# Altium footprint library PCB_Module.PcbLib: 31 footprints (part 2 of 2)
Each footprint in its own frame and in the unit in brackets; x right, y up, seen from the top. Pads: shape width x height; smd on the part's side, far side on the other; paste and mask are expansions set on the pad; w line width, h text height; cw(c..) or ccw(c..) is an arc to the next point about the centre after c.
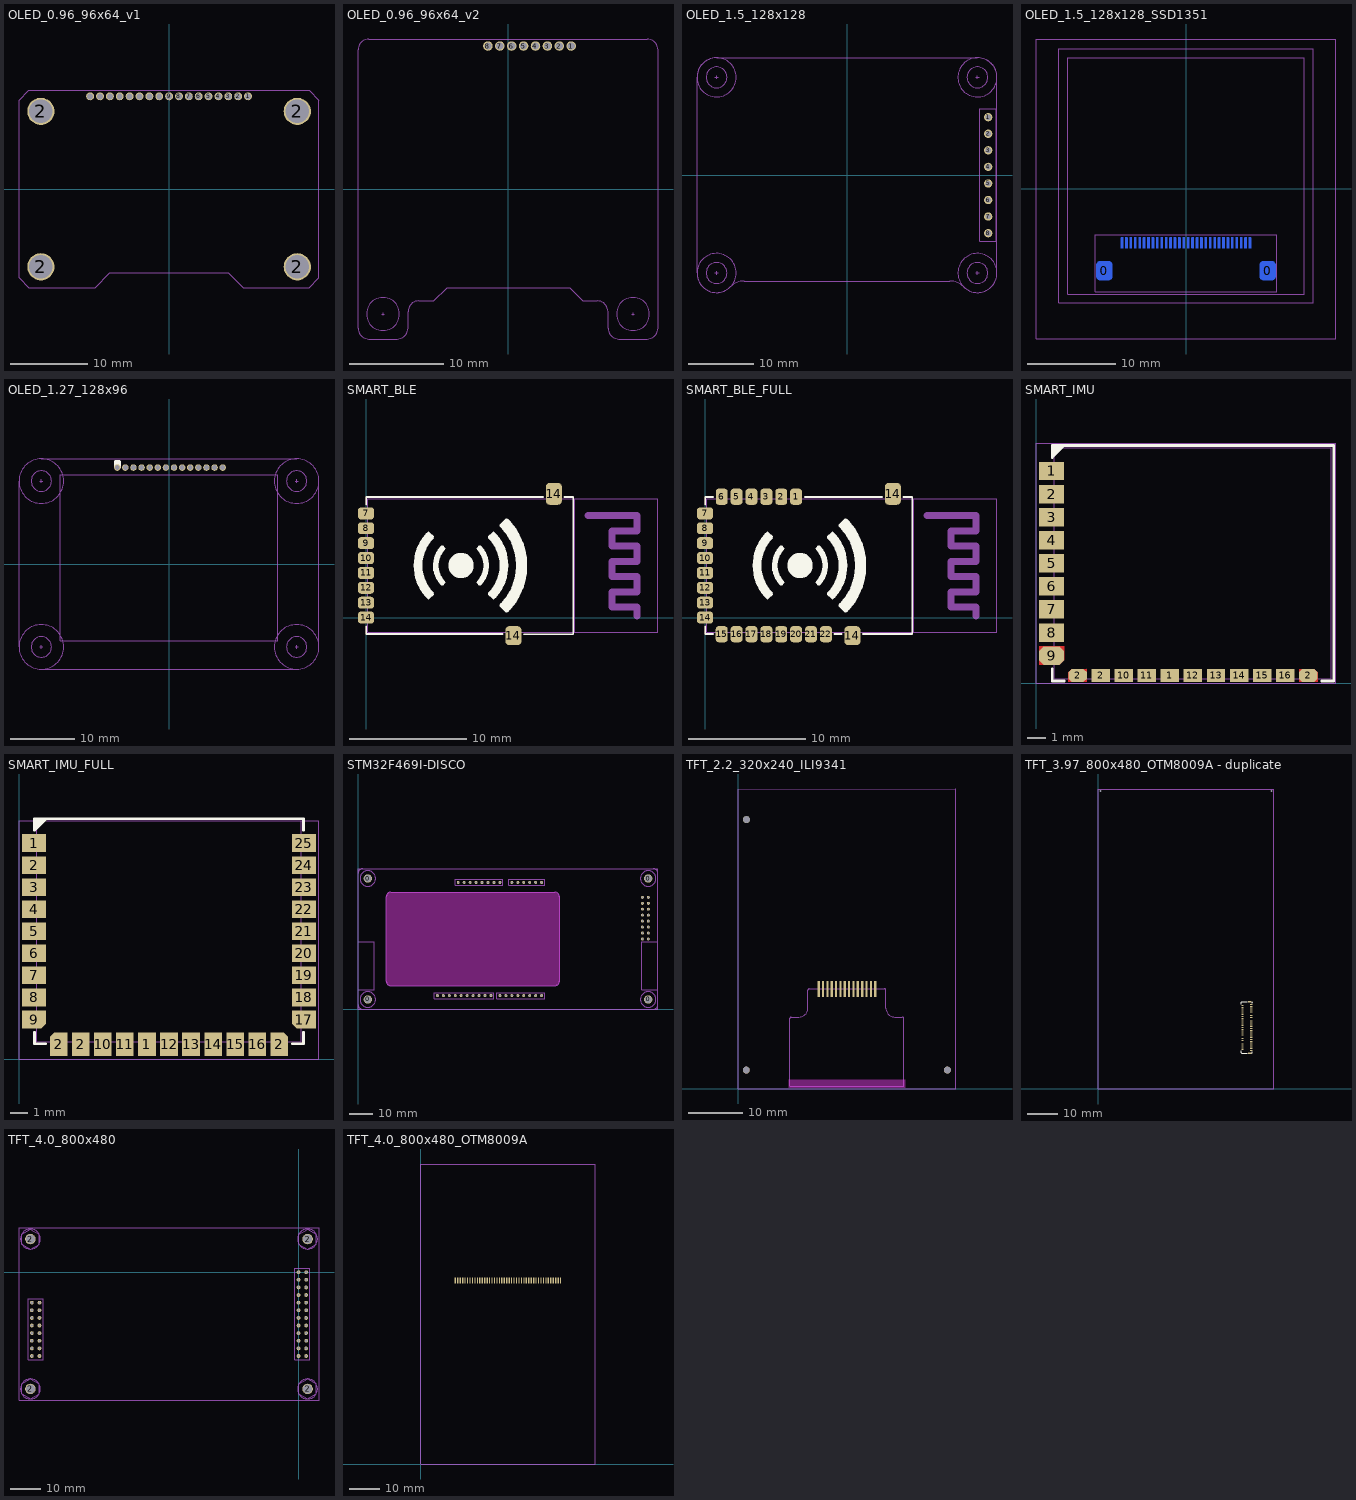
[diagram p1: the footprints below, top view; thin cyan lines are the x and y axes]

## OLED_0.96_96x64_v1 [mil]
pads (21):
  round 40 hole 30: 1(400.45,469.72) 2(350.45,469.72) 3(300.45,469.72) 4(250.45,469.72) 5(200.45,469.72) 6(150.45,469.72) 7(100.45,469.72) 8(50.45,469.72) 9(0.45,469.72) 10(-49.55,469.72) 11(-99.55,469.72) 12(-149.55,469.72) 13(-199.55,469.72) 14(-249.55,469.73) 15(-299.55,469.73) 16(-349.55,469.73) 17(-399.55,469.73)
  round 137.8 hole 118.11 mask+0: 2(-649.15,-393.98) 2(-649.15,393.43) 2(650.06,-393.98) 2(650.06,393.43)
Mechanical 13:
  lines w2: -760,-449.82 -710,-499.82 -374.09,-499.82 -299.55,-425.27 300.45,-425.27 375,-499.82 710,-499.82 760,-449.82 760,450.18 710,500.18 -710,500.18 -760,450.18 -760,-449.82

## OLED_0.96_96x64_v2 [mil]
pads (8):
  round 40 hole 30: 1(265.45,600.55) 2(215.45,600.55) 3(165.45,600.55) 4(115.45,600.55) 5(65.45,600.55) 6(15.45,600.55) 7(-34.55,600.55) 8(-84.55,600.55)
Mechanical 13:
  circle w2: c-525,-525 r69
  circle w2: c525,-525 r69
  lines w2: -530,-525 -520,-525 ; -525,-530 -525,-520 ; 520,-525 530,-525 ; 525,-530 525,-520 ; -630,-585 ccw(c-585,-585) -585,-630 -465,-630 ccw(c-465,-585) -420,-585 -420,-515 cw(c-375,-515) -375,-470 -310.91,-470 -255.45,-414.55 259.55,-414.55 315,-470 375,-470 cw(c375,-515) 420,-515 420,-585 ccw(c465,-585) 465,-630 585,-630 ccw(c585,-585) 630,-585 630,585 ccw(c585,585) 585,630 -585,630 ccw(c-585,585) -630,585 -630,-585
3D body "female_header_a-bl127-eg-z08d.stp": height 133.86, standoff -94.49, extent -117.43,565.11 298.32,635.98

## OLED_1.5_128x128 [mil]
pads (8):
  round 50 hole 32: 1(852.4,350) 2(852.4,250) 3(852.4,150) 4(852.4,50) 5(852.4,-50) 6(852.4,-150) 7(852.4,-250) 8(852.4,-350)
Mechanical 13:
  circle w2: c787.4,590.55 r63
  circle w2: c787.4,590.55 r118.11
  circle w2: c-787.4,590.55 r63
  circle w2: c-787.4,590.55 r118.11
  circle w2: c-787.4,-590.55 r63
  circle w2: c-787.4,-590.55 r118.11
  circle w2: c787.4,-590.55 r63
  circle w2: c787.4,-590.55 r118.11
  lines w2: -797.4,-590.55 -777.4,-590.55 ; -797.4,590.55 -777.4,590.55 ; -787.4,-600.55 -787.4,-580.55 ; -787.4,580.55 -787.4,600.55 ; 777.4,-590.55 797.4,-590.55 ; 777.4,590.55 797.4,590.55 ; 787.4,-600.55 787.4,-580.55 ; 787.4,580.55 787.4,600.55 ; -905.51,-590.55 ccw(c-905.51,-590.55) -905.51,-590.55 ; -905.51,-590.55 ccw(c-787.4,-590.55) -787.4,-708.66 ccw(c-787.4,-590.55) -703.89,-674.07 cw(c-620.37,-757.58) -620.37,-639.47 620.37,-639.47 ; -905.51,-590.55 -905.51,590.55 cw(c-787.4,590.55) -787.4,708.66 787.4,708.66 cw(c787.4,590.55) 905.51,590.55 ; 620.37,-639.47 cw(c620.37,-757.58) 703.89,-674.07 ccw(c787.4,-590.55) 787.4,-708.66 ccw(c787.4,-590.55) 905.51,-590.55 905.51,590.55 ; 620.37,-639.47 620.37,-639.47 ; 905.51,590.55 ccw(c905.51,590.55) 905.51,590.55 ; 802.4,-400 802.4,400 902.4,400 902.4,-400 802.4,-400
T-Component:
  lines w2: 802.4,-400 902.4,-400 902.4,400 802.4,400 802.4,-400
3D body "QCopterRCsE_OLED_Pcb.step": height -138.58, standoff -579.53, extent -905.51,-708.67 905.51,708.66
3D body "female_header_a-bl254-eg-g08d.stp": height 334.65, standoff -125.98, extent 803.19,-404.84 901.62,405

## OLED_1.5_128x128_SSD1351 [mil]
pads (32):
  rrect50% 72x86 smd far side: 0(-364.06,-364.37) 0(364.05,-364.37)
  rrect50% 10x50 smd far side: 1(-285.43,-240.39) 2(-265.75,-240.39) 3(-246.06,-240.39) 4(-226.38,-240.39) 5(-206.69,-240.39) 6(-187.01,-240.39) 7(-167.32,-240.39) 8(-147.64,-240.39) 9(-127.95,-240.39) 10(-108.27,-240.39) 11(-88.58,-240.39) 12(-68.9,-240.39) 13(-49.21,-240.39) 14(-29.53,-240.39) 15(-9.84,-240.39) 16(9.84,-240.39) 17(29.53,-240.39) 18(49.21,-240.39) 19(68.9,-240.39) 20(88.58,-240.39) 21(108.27,-240.39) 22(127.95,-240.39) 23(147.64,-240.39) 24(167.32,-240.39) 25(187.01,-240.39) 26(206.69,-240.39) 27(226.38,-240.39) 28(246.06,-240.39) 29(265.75,-240.39) 30(285.43,-240.39)
Bottom Overlay:
  lines w10: -364.06,-419.37 -364.06,-454.37 364.05,-454.37 364.05,-419.37 ; -364.06,-309.37 -364.06,-254.37 -304.06,-254.37 ; 304.05,-254.37 364.05,-254.37 364.05,-309.37
Mechanical 13:
  lines w2: -669.29,-669.29 -669.29,669.29 669.29,669.29 669.29,-669.29 -669.29,-669.29 ; -566.93,-507.87 -566.93,625.98 566.93,625.98 566.93,-507.87 -566.93,-507.87 ; -527.56,-468.5 527.56,-468.5 527.56,586.61 -527.56,586.61 -527.56,-468.5
T-Component:
  lines w2: -404.06,-459.37 404.05,-459.37 404.05,-204.37 -404.06,-204.37 -404.06,-459.37
3D body: height 39.37, standoff 0, extent -669.29,-669.29 669.29,669.29
3D body: height 62.99, standoff 23.62, extent -527.56,-468.5 527.56,586.61

## OLED_1.27_128x96 [mil]
pads (14):
  round 40 hole 30: 1(-319.09,594.69) 2(-269.09,594.69) 3(-219.09,594.69) 4(-169.09,594.69) 5(-119.09,594.69) 6(-69.09,594.69) 7(-19.09,594.69) 8(30.91,594.69) 9(80.91,594.69) 10(130.91,594.69) 11(180.91,594.69) 12(230.91,594.69) 13(280.91,594.69) 14(330.91,594.69)
Top Overlay:
  region: -299.09,634.69 -299.09,594.69 -304.09,594.69 -304.38,597.61 -306.62,603.02 -310.76,607.16 -316.17,609.4 -319.09,609.69 -322.02,609.4 -327.43,607.16 -331.57,603.02 -333.81,597.61 -334.09,594.69 -339.1,594.69 -339.1,634.68 -334.09,639.69 -304.09,639.69
Bottom Overlay:
  region: -299.09,634.69 -299.09,594.69 -304.09,594.69 -304.38,597.61 -306.62,603.02 -310.76,607.16 -316.17,609.4 -319.09,609.68 -319.09,609.69 -322.02,609.4 -327.43,607.16 -331.57,603.02 -333.81,597.61 -334.09,594.69 -339.1,594.69 -339.1,634.68 -334.09,639.69 -304.09,639.69
Mechanical 13:
  circle w2: c787.4,511.81 r137.8
  circle w2: c787.4,-511.81 r137.8
  circle w2: c-787.4,-511.81 r137.8
  circle w2: c-787.4,511.81 r137.8
  circle w2: c-787.4,511.81 r63
  circle w2: c787.4,511.81 r63
  circle w2: c787.4,-511.81 r63
  circle w2: c-787.4,-511.81 r63
  lines w2: -797.4,-511.81 -777.4,-511.81 ; -797.4,511.81 -777.4,511.81 ; -787.4,-649.61 cw(c-787.4,-511.81) -925.2,-511.81 ; -787.4,-521.81 -787.4,-501.81 ; -787.4,501.81 -787.4,521.81 ; -787.32,-649.61 787.4,-649.61 ccw(c787.4,-511.81) 925.2,-511.81 925.2,511.81 ccw(c787.4,511.81) 787.4,649.61 -787.4,649.61 ccw(c-787.4,511.81) -925.2,511.81 -925.2,-511.81 ; 777.4,-511.81 797.4,-511.81 ; 777.4,511.81 797.4,511.81 ; 787.4,-521.81 787.4,-501.81 ; 787.4,501.81 787.4,521.81 ; -925.2,-511.81 -925.2,-511.81 ; -669.29,-472.44 669.29,-472.44 669.29,551.18 -669.29,551.18 -669.29,-472.44

## SMART_BLE [mil]
pads (10):
  rrect50% 54x40 smd: 7(0,350) 8(0,300) 9(0,250) 10(0,200) 11(0,150) 12(0,100) 13(0,50) 14(0,0)
  rrect50% 54x64 smd: 14(495,-61)
  rrect50% 54x74 smd: 14(631,416)
Top Overlay:
  circle w45: c319,175 r20
  lines w6: 1,-29 1,-55 459,-55 ; 1,379 1,405 595,405 ; 531,-56 696,-56 696,405 667,405
  lines w10: 203.5,72.5 210,66 224,80 219,85 ; 204,278 210,284 224,270 219,265 ; 251,117 256,112 262,118 257,123 ; 251,233 256,238 262,232 257,227 ; 381,123 376,118 382,112 387,117 ; 381,227 376,232 382,238 387,233 ; 419,85 414,80 428,66 434,72 ; 419,265 414,270 428,284 434.5,277.5 ; 462.5,50.5 453,41 472.5,21.5 482,31 ; 463,299 453,309 472.5,328.5 482.5,318.5
  lines w19: 255.58,118.63 cw(c319,175) 255.63,231.43 ; 382.37,118.57 ccw(c319,175) 382.42,231.37
  lines w30: 209.76,80.79 cw(c319,175) 209.76,269.21 ; 428.24,80.79 ccw(c319,175) 428.24,269.21
  lines w38: 472.57,41.25 ccw(c319,175) 472.57,308.75
Mechanical 13:
  lines w2: 701,-50 701,400 ; 6,-50 981,-50 981,400 6,400 6,-50
  lines w23.62: 746,342.4 910.41,342.4 910.41,291.22 826,291.22 826,240.04 910.41,240.04 910.41,188.86 826,188.86 826,137.68 910.41,137.68 910.41,86.5 826,86.5 826,35.31 910.41,35.31 910.41,4.76
3D body "SmartBLE_Pcb.step": height 60.16, standoff 3.8, extent 6,-50 981,400

## SMART_BLE_FULL [mil]
pads (24):
  rrect50% 40x54 smd: 1(306,406) 2(256,406) 3(206,406) 4(156,406) 5(106,406) 6(56,406) 15(56,-56) 16(106,-56) 17(156,-56) 18(206,-56) 19(256,-56) 20(306,-56) 21(356,-56) 22(406,-56)
  rrect50% 54x40 smd: 7(0,350) 8(0,300) 9(0,250) 10(0,200) 11(0,150) 12(0,100) 13(0,50) 14(0,0)
  rrect50% 54x64 smd: 14(495,-61)
  rrect50% 54x74 smd: 14(631,416)
Top Overlay:
  circle w45: c319,175 r20
  lines w6: 1,-29 1,-55 27,-55 ; 1,379 1,405 27,405 ; 335,405 595,405 ; 435,-55 459,-55 ; 531,-55 696,-55 696,405 667,405
  lines w10: 203.5,72.5 210,66 224,80 219,85 ; 204,278 210,284 224,270 219,265 ; 251,117 256,112 262,118 257,123 ; 251,233 256,238 262,232 257,227 ; 381,123 376,118 382,112 387,117 ; 381,227 376,232 382,238 387,233 ; 419,85 414,80 428,66 434,72 ; 419,265 414,270 428,284 434.5,277.5 ; 462.5,50.5 453,41 472.5,21.5 482,31 ; 463,299 453,309 472.5,328.5 482.5,318.5
  lines w19: 255.58,118.63 cw(c319,175) 255.63,231.43 ; 382.37,118.57 ccw(c319,175) 382.42,231.37
  lines w30: 209.76,80.79 cw(c319,175) 209.76,269.21 ; 428.24,80.79 ccw(c319,175) 428.24,269.21
  lines w38: 472.57,41.25 ccw(c319,175) 472.57,308.75
Mechanical 13:
  lines w2: 701,-50 701,400 ; 6,-50 981,-50 981,400 6,400 6,-50
  lines w23.62: 746,342.4 910.41,342.4 910.41,291.22 826,291.22 826,240.04 910.41,240.04 910.41,188.86 826,188.86 826,137.68 910.41,137.68 910.41,86.5 826,86.5 826,35.31 910.41,35.31 910.41,4.76
3D body "SmartBLE_Pcb.step": height 60.16, standoff 3.8, extent 6,-50 981,400

## SMART_IMU [mil]
pads (20):
  rect 54x40 smd: 1(34,460) 2(34,410) 3(34,360) 4(34,310) 5(34,260) 6(34,210) 7(34,160) 8(34,110)
  rect 40x28 smd: 1(290,17) 2(140,17) 10(190,17) 11(240,17) 12(340,17) 13(390,17) 14(440,17) 15(490,17) 16(540,17)
  oct 40x28 smd: 2(90,17) 2(590,17)
  oct 54x40 smd: 9(34,60)
Top Layer:
  region: 570,3 570,31 603,31 610,24 610,3
  region: 7,80 61,80 61,50 51,40 7,40
  region: 110,3 70,3 70,24 77,31 110,31
Top Overlay:
  region: 35,515 61,515 35,489
  lines w6: 35,31 35,5 61,5 ; 61,515 35,489 35,515 645,515 645,5 619,5
Mechanical 13:
  lines w2: 40,10 640,10 640,510 40,510 40,10
T-Component:
  lines w2: 0,0 650,0 650,520 0,520 0,0
3D body "SmartIMU_Pcb.step": height 84.06, standoff -0.4, extent 40,10 640.01,510

## SMART_IMU_FULL [mil]
pads (41):
  rect 54x40 smd: 1(34,490) 2(34,440) 3(34,390) 4(34,340) 5(34,290) 6(34,240) 7(34,190) 8(34,140) 18(646,140) 19(646,190) 20(646,240) 21(646,290) 22(646,340) 23(646,390) 24(646,440) 25(646,490)
  rect 40x54 smd: 1(290,34) 2(140,34) 10(190,34) 11(240,34) 12(340,34) 13(390,34) 14(440,34) 15(490,34) 16(540,34)
  rect 10x10 smd: 2(75,12) 2(105,12) 2(105,56) 2(575,12) 2(575,56) 2(605,12) 9(12,75) 9(12,105) 9(56,105) 17(624,105) 17(668,75) 17(668,105)
  oct 40x54 smd: 2(90,34) 2(590,34)
  oct 54x40 smd: 9(34,90) 17(646,90)
Top Overlay:
  region: 35,545 61,545 35,519
  lines w6: 35,61 35,35 61,35 ; 61,545 35,519 35,545 645,545 645,519 ; 619,35 645,35 645,61
Mechanical 13:
  lines w2: 40,40 640,40 640,540 40,540 40,40
T-Component:
  lines w2: 0,0 0,540 680,540 680,0 0,0
3D body "SmartIMU_Pcb.step": height 84.06, standoff -0.4, extent 40,40 640,540

## STM32F469I-DISCO [mm]
pads (52):
  round 3.556 hole 3.048 mask+0: 0(4.19,4.19) 0(4.19,55.81) 0(123.81,4.19) 0(123.81,55.81)
  round 1.27 hole 0.813: 1(42.771,54.13) 2(45.311,54.13) 3(47.851,54.13) 4(50.391,54.13) 5(52.931,54.13) 6(55.471,54.13) 7(58.011,54.13) 8(60.551,54.13) 9(65.631,54.13) 10(68.171,54.13) 11(70.711,54.13) 12(73.251,54.13) 13(75.791,54.13) 14(78.331,54.13) 15(78.331,5.87) 16(75.791,5.87) 17(73.251,5.87) 18(70.711,5.87) 19(68.171,5.87) 20(65.631,5.87) 21(63.091,5.87) 22(60.551,5.87) 23(56.741,5.87) 24(54.201,5.87) 25(51.661,5.87) 26(49.121,5.87) 27(46.581,5.87) 28(44.041,5.87) 29(41.501,5.87) 30(38.961,5.87) 31(36.421,5.87) 32(33.881,5.87) 33(121.345,47.78) 34(123.885,47.78) 35(121.345,45.24) 36(123.885,45.24) 37(121.345,42.7) 38(123.885,42.7) 39(121.345,40.16) 40(123.885,40.16) 41(121.345,37.62) 42(123.885,37.62) 43(121.345,35.08) 44(123.885,35.08) 45(121.345,32.54) 46(123.885,32.54) 47(121.345,30) 48(123.885,30)
Keep-Out Layer:
  board cut-out: 12.065,12.033 12.065,48.038 12.065,48.235 12.142,48.621 12.293,48.985 12.511,49.313 12.79,49.592 13.118,49.81 13.482,49.961 13.868,50.038 14.065,50.038 83.979,50.038 84.176,50.038 84.562,49.961 84.926,49.81 85.254,49.592 85.533,49.313 85.751,48.985 85.902,48.621 85.979,48.235 85.979,48.038 85.979,12.033 85.979,11.836 85.902,11.45 85.751,11.086 85.533,10.758 85.254,10.479 84.926,10.261 84.562,10.11 84.176,10.033 83.979,10.033 14.065,10.033 13.868,10.033 13.482,10.11 13.118,10.261 12.79,10.479 12.511,10.758 12.293,11.086 12.142,11.45 12.065,11.836
Mechanical 13:
  circle w0.051: c4.19,55.81 r3.327
  circle w0.051: c4.19,4.19 r3.327
  circle w0.051: c123.81,4.19 r3.327
  circle w0.051: c123.81,55.81 r3.327
  lines w0.051: 0,2 ccw(c2,2) 2,0 126,0 ccw(c126,2) 128,2 128,8.255 120.964,8.255 120.964,28.829 128,28.829 128,58 ccw(c126,58) 126,60 2,60 ccw(c2,58) 0,58 0,28.829 7.036,28.829 7.036,8.255 0,8.255 0,2 ; 12.065,12.033 ccw(c14.065,12.033) 14.065,10.033 83.979,10.033 ccw(c83.979,12.033) 85.979,12.033 85.979,48.038 ccw(c83.979,48.038) 83.979,50.038 14.065,50.038 ccw(c14.065,48.038) 12.065,48.038 12.065,12.033 ; 32.611,4.6 58.011,4.6 58.011,7.14 32.611,7.14 32.611,4.6 ; 41.501,52.86 41.501,55.4 61.821,55.4 61.821,52.86 41.501,52.86 ; 59.281,4.6 59.281,7.14 79.601,7.14 79.601,4.6 59.281,4.6 ; 64.361,52.86 79.601,52.86 79.601,55.4 64.361,55.4 64.361,52.86
T-Component:
  lines w0.051: 0,0 128,0 128,60 0,60 0,0
3D body "pin_header_aw140-eg-g08d.stp": height 8.2, standoff -3, extent 59.281,4.621 79.601,7.119
3D body "pin_header_aw140-eg-g10d.stp": height 8.2, standoff -3, extent 32.611,4.621 58.011,7.119
3D body "pin_header_aw140-eg-g06d.stp": height 8.2, standoff -3, extent 64.361,52.881 79.601,55.379
3D body "pin_header_aw140-eg-g08d.stp": height 8.2, standoff -3, extent 41.501,52.881 61.821,55.379
3D body "female_header_a-bl254-dg-g16d.stp": height 8.5, standoff -3.2, extent 120.115,28.605 125.115,49.175

## TFT_2.2_320x240_ILI9341 [mil]
pads (17):
  round 50 hole 50 unplated mask+0: 1(59.74,137) 1(60.74,1952) 1(1516.74,137)
  rect 16x118 smd mask+1: 1(993.87,724) 2(962.38,724) 3(930.88,724) 4(899.39,724) 5(867.89,724) 6(836.39,724) 7(804.9,724) 8(773.4,724) 9(741.9,724) 10(710.41,724) 11(678.91,724) 12(647.42,724) 13(615.92,724) 14(584.42,724)
Keep-Out Layer:
  board cut-out: 1212,66.34 1212,8.23 367.78,8.23 367.78,66.34
Mechanical 13:
  lines w2: 0,0 1579,0 1579,2174 0,2174 0,0 ; 376,21.34 376,511.34 cw(c386,511.34) 386,521.34 441,521.34 ccw(c441,586.34) 506,586.34 506,716.34 cw(c516,716.34) 516,726.34 1061,726.34 cw(c1061,716.34) 1071,716.34 1071,586.34 ccw(c1136,586.34) 1136,521.34 1191,521.34 cw(c1191,511.34) 1201,511.34 1201,21.34 376,21.34

## TFT_3.97_800x480_OTM8009A - duplicate [mil]
pads (55):
  round 0 hole 25 mask+0: 0(31.5,3827.38) 0(2226.5,3827.38)
  rect 40x16 smd: 0(1947,459.27) 0(1947,1118.72)
  rect 30x12 smd: 1(1967,1084.28) 2(1855,1072.46) 3(1967,1060.65) 4(1855,1048.84) 5(1967,1037.03) 6(1855,1025.22) 7(1967,1013.41) 8(1855,1001.6) 9(1967,989.79) 10(1855,977.98) 11(1967,966.16) 12(1855,954.35) 13(1967,942.54) 14(1855,930.73) 15(1967.19,918.92) 16(1855,907.11) 17(1967,895.3) 18(1855,883.49) 19(1967,871.68) 20(1855,859.87) 21(1967,848.05) 22(1855,836.24) 23(1967,824.43) 24(1855,812.62) 25(1967,800.81) 26(1855,789) 27(1967,777.19) 28(1855,765.38) 29(1967,753.57) 30(1855,741.76) 31(1967,729.95) 32(1855,718.13) 33(1967,706.32) 34(1855,694.51) 35(1967,682.7) 36(1855,670.89) 37(1967,659.08) 38(1855,647.27) 39(1967,635.46) 40(1855,623.65) 41(1967,611.84) 42(1855,600.02) 43(1967,588.21) 44(1855,576.4) 45(1967,564.59) 46(1855,552.78) 47(1967,540.97) 48(1855,529.16) 49(1967,517.35) 50(1855,505.54) 51(1967,493.73)
Top Overlay:
  lines w6: 1841,491 1841,464 1846,459 ; 1841,1087 1841,1114 1846,1119 ; 1846.28,459 1918,459 ; 1846.28,1119 1918,1119 ; 1976,459 1981,464 1981,479 ; 1976,1119 1981,1114 1981,1099
Mechanical 13:
  lines w2: 0,0 2258,0 2258,3851 0,3851 0,0
T-Component:
  lines w2: 0,0 2258,0 2258,3851 0,3851 0,0
3D body "10061122511420hlf.stp": height 35.43, standoff 0, extent 1842.15,452.4 1979.55,1125.62

## TFT_4.0_800x480 [mil]
pads (44):
  round 50 hole 31: 1(0,0) 2(100,0) 3(0,-100) 4(100,-100) 5(0,-200) 6(100,-200) 7(0,-300) 8(100,-300) 9(0,-400) 10(100,-400) 11(0,-500) 12(100,-500) 13(0,-600) 14(100,-600) 15(0,-700) 16(100,-700) 17(0,-800) 18(100,-800) 19(0,-900) 20(100,-900) 21(0,-1000) 22(100,-1000) 23(0,-1100) 24(100,-1100) 25(-3500,-400) 26(-3400,-400) 27(-3500,-500) 28(-3400,-500) 29(-3500,-600) 30(-3400,-600) 31(-3500,-700) 32(-3400,-700) 33(-3500,-800) 34(-3400,-800) 35(-3500,-900) 36(-3400,-900) 37(-3500,-1000) 38(-3400,-1000) 39(-3500,-1100) 40(-3400,-1100)
  round 137.8 hole 118.11 mask+0: 2(-3518.5,-1532.5) 2(-3518.5,435) 2(118.5,-1532.5) 2(118.5,435)
Mechanical 13:
  circle w2: c118.5,-1532.5 r130.98
  circle w2: c-3518.5,-1532.5 r130.98
  circle w2: c-3518.5,435 r130.98
  circle w2: c118.5,435 r130.98
  lines w2: -3668.5,-1682.5 268.5,-1682.5 268.5,585 -3668.5,585 -3668.5,-1682.5 ; -3631.93,-1597.99 -3518.5,-1663.48 -3405.08,-1597.99 -3405.08,-1467.01 -3518.5,-1401.52 -3631.93,-1467.01 -3631.93,-1597.99 ; -3631.93,369.51 -3518.5,304.02 -3405.08,369.51 -3405.08,500.49 -3518.5,565.98 -3631.93,500.49 -3631.93,369.51 ; -3550,-1150 -3550,-350 -3350,-350 -3350,-1150 -3550,-1150 ; -50,-1150 -50,50 150,50 150,-1150 -50,-1150 ; 5.07,-1597.99 5.07,-1467.01 118.5,-1401.52 231.93,-1467.01 231.93,-1597.99 118.5,-1663.48 5.07,-1597.99 ; 5.07,369.51 118.5,304.02 231.93,369.51 231.93,500.49 118.5,565.98 5.07,500.49 5.07,369.51
B-Component:
  lines w1: -3510,-400 -3490,-400 ; -3500,-410 -3500,-390 ; -10,0 10,0 ; 0,-10 0,10

## TFT_4.0_800x480_OTM8009A [mm]
pads (44):
  rect 0.4x2 smd: 1(11.3,60) 2(12.1,60) 3(12.9,60) 4(13.7,60) 5(14.5,60) 6(15.3,60) 7(16.1,60) 8(16.9,60) 9(17.7,60) 10(18.5,60) 11(19.3,60) 12(20.1,60) 13(20.9,60) 14(21.7,60) 15(22.5,60) 16(23.3,60) 17(24.1,60) 18(24.9,60) 19(25.7,60) 20(26.5,60) 21(27.3,60) 22(28.1,60) 23(28.9,60) 24(29.7,60) 25(30.5,60) 26(31.3,60) 27(32.1,60) 28(32.9,60) 29(33.7,60) 30(34.5,60) 31(35.3,60) 32(36.1,60) 33(36.9,60) 34(37.7,60) 35(38.5,60) 36(39.3,60) 37(40.1,60) 38(40.9,60) 39(41.7,60) 40(42.5,60) 41(43.3,60) 42(44.1,60) 43(44.9,60) 44(45.7,60)
Mechanical 13:
  lines w0.051: 0,0 0,98.044 57.023,98.044 57.023,0 0,0

## z_other [mil]
3D body "User Library-ESP-03.STEP": height 91.34, standoff -44.09, extent -910,-285.55 -425.75,395.55
3D body "User Library-ESP-12E.STEP": height 104.33, standoff -1.38, extent -300.16,-252.64 330.15,692.44
3D body "User Library-WiFi ESP8266.STEP": height 141.73, standoff -1.97, extent 415.08,-302.32 1045,532.32